# Altium footprint library FUSC1608X30N.PcbLib: 1 footprints
Each footprint in its own frame and in the unit in brackets; x right, y up, seen from the top. Pads: shape width x height; smd on the part's side, far side on the other; paste and mask are expansions set on the pad; w line width, h text height; cw(c..) or ccw(c..) is an arc to the next point about the centre after c.
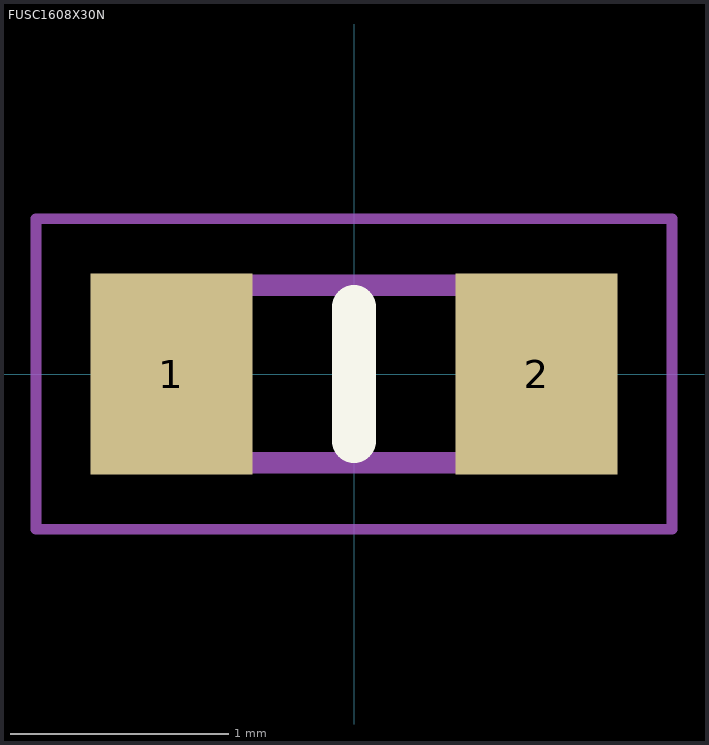
[diagram p0: the footprint, top view; thin cyan lines are the x and y axes]

## FUSC1608X30N [mm]
pads (2):
  rect 0.74x0.92 smd: 1(-0.835,0) 2(0.835,0)
Top Overlay:
  lines w0.2: 0,-0.306 0,0.306
Mechanical 15:
  lines w0.1: -0.8,-0.406 0.8,-0.406 0.8,0.406 -0.8,0.406 -0.8,-0.406
Mechanical 20:
  lines w0.05: -1.455,-0.71 1.455,-0.71 1.455,0.71 -1.455,0.71 -1.455,-0.71